# Altium footprint library Components_3011.PcbLib: 5 footprints
Each footprint in its own frame and in the unit in brackets; x right, y up, seen from the top. Pads: shape width x height; smd on the part's side, far side on the other; paste and mask are expansions set on the pad; w line width, h text height; cw(c..) or ccw(c..) is an arc to the next point about the centre after c.
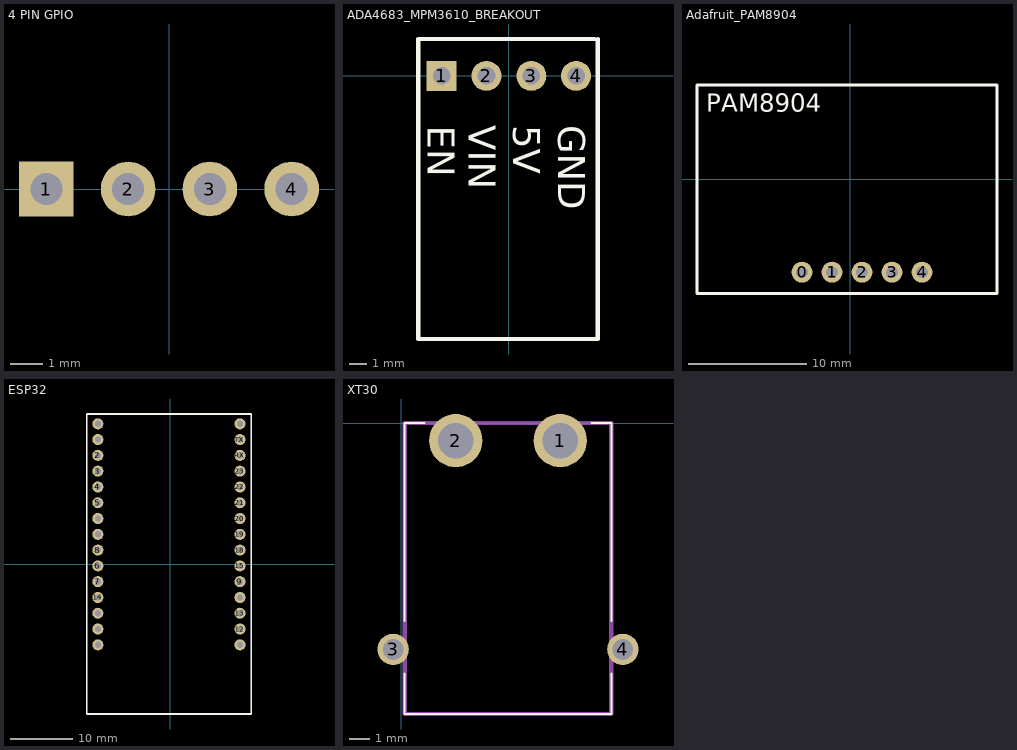
[diagram p0: the footprints below, top view; thin cyan lines are the x and y axes]

## 4 PIN GPIO [mm]
pads (4):
  rect 1.7x1.7 / inner round 1.524 / far side rect 1.7x1.7 hole 1: 1(-3.81,0)
  round 1.7 / inner round 1.524 / far side round 1.7 hole 1: 2(-1.27,0) 3(1.27,0) 4(3.81,0)
3D body "PinSocket_1x04_P2.54mm_Vertical.step": height 8.5, standoff -3.1, extent -5.243,-1.32 4.917,1.22

## ADA4683_MPM3610_BREAKOUT [mm]
pads (4):
  rect 1.7x1.7 / inner round 1.524 / far side rect 1.7x1.7 hole 1: 1(-3.81,0)
  round 1.7 / inner round 1.524 / far side round 1.7 hole 1: 2(-1.27,0) 3(1.27,0) 4(3.81,0)
Top Overlay:
  lines w0.254: 4.87,2.088 -5.13,2.088 -5.13,-14.912 5.029,-14.912 5.03,2.088
  text "GND" at 2.794,-2.794 h1.52
  text "5V" at 0.254,-2.794 h1.52
  text "VIN" at -2.286,-2.794 h1.52
  text "EN" at -4.603,-2.815 h1.52
3D body "PinSocket_1x04_P2.54mm_Vertical.step": height 8.5, standoff -3.1, extent -5.243,-1.32 4.917,1.22

## Adafruit_PAM8904 [mil] "Audio Amplifier footprint"
pads (5):
  round 70 hole 39.37: 0(-160,-309.97) 1(-60,-309.97) 2(40,-309.97) 3(140,-309.97) 4(240,-309.97)
Top Overlay:
  lines w10: -510,-380 490,-380 490,315 -510,315 -510,-380
  text "PAM8904" at -480,225 h60
Mechanical 3:
  region: 130,-319.97 130,-299.97 150,-299.97 150,-319.97
  region: 30,-319.97 30,-299.97 50,-299.97 50,-319.97
  region: -70,-319.97 -70,-299.97 -50,-299.97 -50,-319.97
  region: -170,-319.97 -170,-299.97 -150,-299.97 -150,-319.97
  region: 230,-319.97 230,-299.97 250,-299.97 250,-319.97

## ESP32 [mil]
pads (30):
  round 70 hole 39.37: 0/N(-460,288) 1/N(-460,188) 2(-460,688) 3(-460,588) 3V3(-460,888) 4(-460,488) 5(-460,388) 5V0(-460,-412) 6(-460,-12) 7(-460,-112) 8(-460,88) 9(440,-112) 12(440,-412) 13(440,-312) 14(-460,-212) 15(440,-12) 18(440,88) 19(440,188) 20(440,288) 21(440,388) 22(440,488) 23(440,588) GND1(-460,-312) GND2(-460,-512) GND3(440,888) GND4(440,-212) GND5(440,-512) RST(-460,788) RX(440,688) TX(440,788)
Top Overlay:
  lines w10: -530.07,-950 511.2,-950 511.2,950 -530.07,950 -530.07,-950

## XT30 [mm]
pads (4):
  round 2.55 hole 1.7: 1(7.608,-0.823) 2(2.608,-0.823)
  round 1.5 hole 1: 3(-0.392,-10.823) 4(10.608,-10.823)
Top Overlay:
  lines w0.1: 0.158,-11.972 0.158,-13.922 10.058,-13.922 10.058,-11.972 ; 0.158,-9.472 0.158,0.027 1.108,0.027 ; 9.108,0.027 10.058,0.027 10.058,-9.472
Mechanical 15:
  lines w0.2: 0.158,-13.922 10.058,-13.922 10.058,0.027 0.158,0.027 0.158,-13.922